# Altium integrated library Components - 26.10.26 - 22.22.IntLib: 1 symbol
Pins are listed as number, name and electrical type; pins without a type are passive.

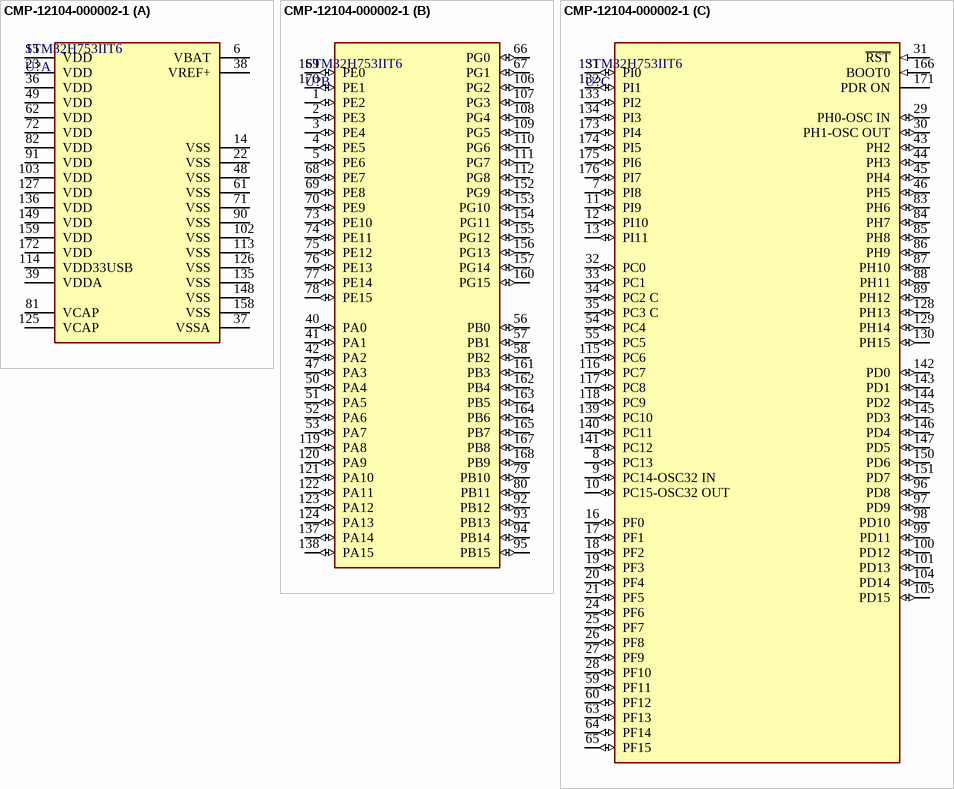
[diagram p0: symbol CMP-12104-000002-1]

## CMP-12104-000002-1
designator U?, comment STM32H753IIT6
LQFP 176 24X24X1.4; Manufacturer: STMicroelectronics; Number Of I/Os: 140; Standoff Height: 0.05mm; Memory Size: 2MBytes; Interface: I2C,SPI,UART,USART,CAN,USB,LIN,IrDA,Ethernet,I2S,SMBus,Other; Nominal Supply Current: 10-165mA; Number Of I2C Channels: 4; Number Of Timers/Counters: 20; Max Supply Voltage: 3.6V; Number Of Pwm Channels: 8; Max Junction Temp: +125°C; Number Of Uart Channels: 9; Memory Type: FLASH; Number Of Spi Channels: 6; Number Of Cores: 1; Ram Size: 1MBytes; Core Architecture: Arm Cortex-M7; Number Of Usb Channels: 2; Data Bus Width: 32bits; Frequency: 400MHz; Number Of Adc Channels: 36; Number Of A/D Converters: 3; Min Supply Voltage: 1.62V; Automotive: No; Ambient Temperature Range High: +85°C; Octopart: https://octopart.com/stm32h753iit6-stmicroelectronics-87680940; Digikey Description: LQFP 176 24X24X1.4; ComponentLink2URL: https://www.st.com/resource/en/datasheet/stm32h753ii.pdf; Manufacturer Part Number: STM32H753IIT6; RoHS: TRUE; Package: LQFP176-1T; Ambient Temperature Range Low: -40°C; Device Class L1: Integrated Circuits (ICs); Temperature: -40°C to +85°C; Ipc Land Pattern Name: QFP50P2600X2600X160-176; Category: IC; Lead Free: Yes; Device Class L2: Embedded Processors and Controllers; Temperature Range High: +85°C; ComponentLink2Description: Datasheet; Device Class L3: DSPs - Digital Signal Processors; Temperature Range Low: -40°C; Height: 1.6mm; Number Of Ethernet Channels: 1
footprint FP-LQFP176-1T-IPC_B
footprint FP-LQFP176-1T-IPC_A
footprint FP-LQFP176-1T-MFG
footprint FP-LQFP176-1T-IPC_C
part A pins: 6 VBAT (power), 14 VSS (power), 15 VDD (power), 22 VSS (power), 23 VDD (power), 36 VDD (power), 37 VSSA (power), 38 VREF+ (power), 39 VDDA (power), 48 VSS (power), 49 VDD (power), 61 VSS (power), 62 VDD (power), 71 VSS (power), 72 VDD (power), 81 VCAP (power), 82 VDD (power), 90 VSS (power), 91 VDD (power), 102 VSS (power), 103 VDD (power), 113 VSS (power), 114 VDD33USB (power), 125 VCAP (power), 126 VSS (power), 127 VDD (power), 135 VSS (power), 136 VDD (power), 148 VSS (power), 149 VDD (power), 158 VSS (power), 159 VDD (power), 172 VDD (power)
part B pins: 1 PE2 (io), 2 PE3 (io), 3 PE4 (io), 4 PE5 (io), 5 PE6 (io), 40 PA0 (io), 41 PA1 (io), 42 PA2 (io), 47 PA3 (io), 50 PA4 (io), 51 PA5 (io), 52 PA6 (io), 53 PA7 (io), 56 PB0 (io), 57 PB1 (io), 58 PB2 (io), 66 PG0 (io), 67 PG1 (io), 68 PE7 (io), 69 PE8 (io), 70 PE9 (io), 73 PE10 (io), 74 PE11 (io), 75 PE12 (io), 76 PE13 (io), 77 PE14 (io), 78 PE15 (io), 79 PB10 (io), 80 PB11 (io), 92 PB12 (io), 93 PB13 (io), 94 PB14 (io), 95 PB15 (io), 106 PG2 (io), 107 PG3 (io), 108 PG4 (io), 109 PG5 (io), 110 PG6 (io), 111 PG7 (io), 112 PG8 (io), 119 PA8 (io), 120 PA9 (io), 121 PA10 (io), 122 PA11 (io), 123 PA12 (io), 124 PA13 (io), 137 PA14 (io), 138 PA15 (io), 152 PG9 (io), 153 PG10 (io), 154 PG11 (io), 155 PG12 (io), 156 PG13 (io), 157 PG14 (io), 160 PG15 (io), 161 PB3 (io), 162 PB4 (io), 163 PB5 (io), 164 PB6 (io), 165 PB7 (io), 167 PB8 (io), 168 PB9 (io), 169 PE0 (io), 170 PE1 (io)
part C pins: 7 PI8 (io), 8 PC13 (io), 9 PC14-OSC32 IN (io), 10 PC15-OSC32 OUT (io), 11 PI9 (io), 12 PI10 (io), 13 PI11 (io), 16 PF0 (io), 17 PF1 (io), 18 PF2 (io), 19 PF3 (io), 20 PF4 (io), 21 PF5 (io), 24 PF6 (io), 25 PF7 (io), 26 PF8 (io), 27 PF9 (io), 28 PF10 (io), 29 PH0-OSC IN (io), 30 PH1-OSC OUT (io), 31 ~{RST} (in), 32 PC0 (io), 33 PC1 (io), 34 PC2 C (io), 35 PC3 C (io), 43 PH2 (io), 44 PH3 (io), 45 PH4 (io), 46 PH5 (io), 54 PC4 (io), 55 PC5 (io), 59 PF11 (io), 60 PF12 (io), 63 PF13 (io), 64 PF14 (io), 65 PF15 (io), 83 PH6 (io), 84 PH7 (io), 85 PH8 (io), 86 PH9 (io), 87 PH10 (io), 88 PH11 (io), 89 PH12 (io), 96 PD8 (io), 97 PD9 (io), 98 PD10 (io), 99 PD11 (io), 100 PD12 (io), 101 PD13 (io), 104 PD14 (io), 105 PD15 (io), 115 PC6 (io), 116 PC7 (io), 117 PC8 (io), 118 PC9 (io), 128 PH13 (io), 129 PH14 (io), 130 PH15 (io), 131 PI0 (io), 132 PI1 (io), 133 PI2 (io), 134 PI3 (io), 139 PC10 (io), 140 PC11 (io), 141 PC12 (io), 142 PD0 (io), 143 PD1 (io), 144 PD2 (io), 145 PD3 (io), 146 PD4 (io), 147 PD5 (io), 150 PD6 (io), 151 PD7 (io), 166 BOOT0 (in), 171 PDR ON (power), 173 PI4 (io), 174 PI5 (io), 175 PI6 (io), 176 PI7 (io)